# Altium schematic symbol library SS36.SchLib: 1 symbol
Pins are listed as number, name and electrical type; pins without a type are passive.

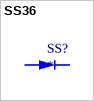
[diagram p0: symbol SS36]

## SS36
designator SS?
footprint SS36 (Molded Diode, 2-Leads)
pins: 1 Anode, 2 Cathode